# Altium footprint library LORA.PcbLib: 1 footprints
Each footprint in its own frame and in the unit in brackets; x right, y up, seen from the top. Pads: shape width x height; smd on the part's side, far side on the other; paste and mask are expansions set on the pad; w line width, h text height; cw(c..) or ccw(c..) is an arc to the next point about the centre after c.
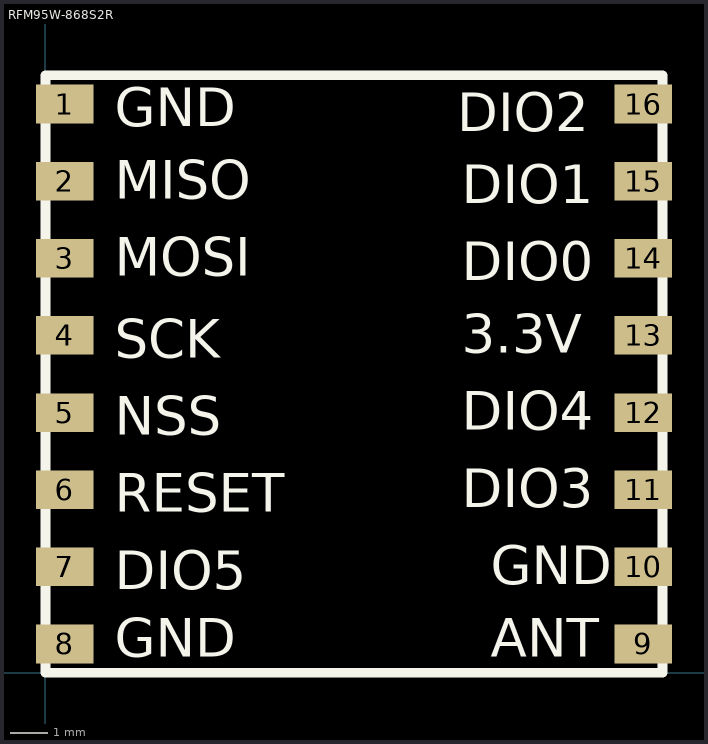
[diagram p0: the footprint, top view; thin cyan lines are the x and y axes]

## RFM95W-868S2R [mil]
pads (16):
  rect 60x40 all layers, no hole: 1(20,590) 2(20,510) 3(20,430) 4(20,350) 5(20,270) 6(20,190) 7(20,110) 8(20,30) 9(620,30) 10(620,110) 11(620,190) 12(620,270) 13(620,350) 14(620,430) 15(620,510) 16(620,590)
Top Overlay:
  lines w10: 0,0 0,620 640,620 640,0 0,0
  text "DIO2" at 427,562 h40
  text "DIO1" at 432,487 h40
  text "DIO0" at 432,407 h40
  text "3.3V" at 432,332 h40
  text "DIO4" at 432,252 h40
  text "DIO3" at 432,172 h40
  text "GND" at 462,92 h40
  text "ANT" at 462,17 h40
  text "GND" at 72,17 h40
  text "DIO5" at 72,87 h40
  text "RESET" at 72,167 h40
  text "NSS" at 72,247 h40
  text "SCK" at 72,327 h40
  text "MOSI" at 72,412 h40
  text "MISO" at 72,492 h40
  text "GND" at 72,567 h40